# EAGLE library part SYN-PADSTRESS (library synthetic_all)
SYN-PADSTRESS Synthetic pad shape stress test Source: JLCEDA/EasyEDA Official Library (https://lceda.cn/ , https://easyeda.com). Copyright of the library data belongs to JLCEDA/EasyEDA.
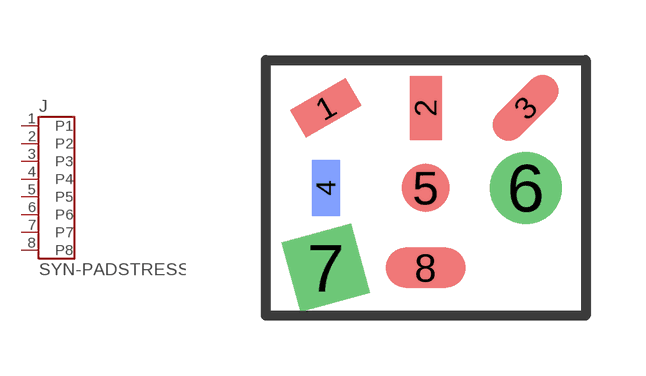
[diagram p3: symbol with the pads of SYN-PADSTRESS-8; footprint SYN-PADSTRESS-8]

Designator prefix J

## SYN-PADSTRESS (JLCPCB_CLASS: Basic Part; LCSC_PACKAGE: SYN-PADSTRESS-8; LCSC_PART: C9000015; MANUFACTURER: SYN-Maker; MPN: SYN-PADSTRESS; SOURCE: Source: JLCEDA/EasyEDA Official Library (https://lceda.cn/ , https://easyeda.com). Copyright of the library data belongs to JLCEDA/EasyEDA.)  [SYN-PADSTRESS-8]
1  P1  pas
2  P2  pas
3  P3  pas
4  P4  pas
5  P5  pas
6  P6  pas
7  P7  pas
8  P8  pas

## Footprint SYN-PADSTRESS-8 (pad centres in mm)
SYN-PADSTRESS-8
smd 1.6 x 0.8 rotated 30: 1 -2.5,2
smd 0.8 x 1.6: 2 0,2
smd 2 x 0.8 rotated 45: 3 2.5,2
smd 0.7 x 1.4 bottom: 4 -2.5,0
smd 1.2 x 1.2: 5 0,0
drill 0.8 pad 1.8 round: 6 2.5,0
drill 0.9 pad 1.8 square: 7 -2.5,-2
smd 2 x 1: 8 0,-2